# Altium footprint library SamacSys.PcbLib: 1008 footprints (part 13 of 63)
Each footprint in its own frame and in the unit in brackets; x right, y up, seen from the top. Pads: shape width x height; smd on the part's side, far side on the other; paste and mask are expansions set on the pad; w line width, h text height; cw(c..) or ccw(c..) is an arc to the next point about the centre after c.
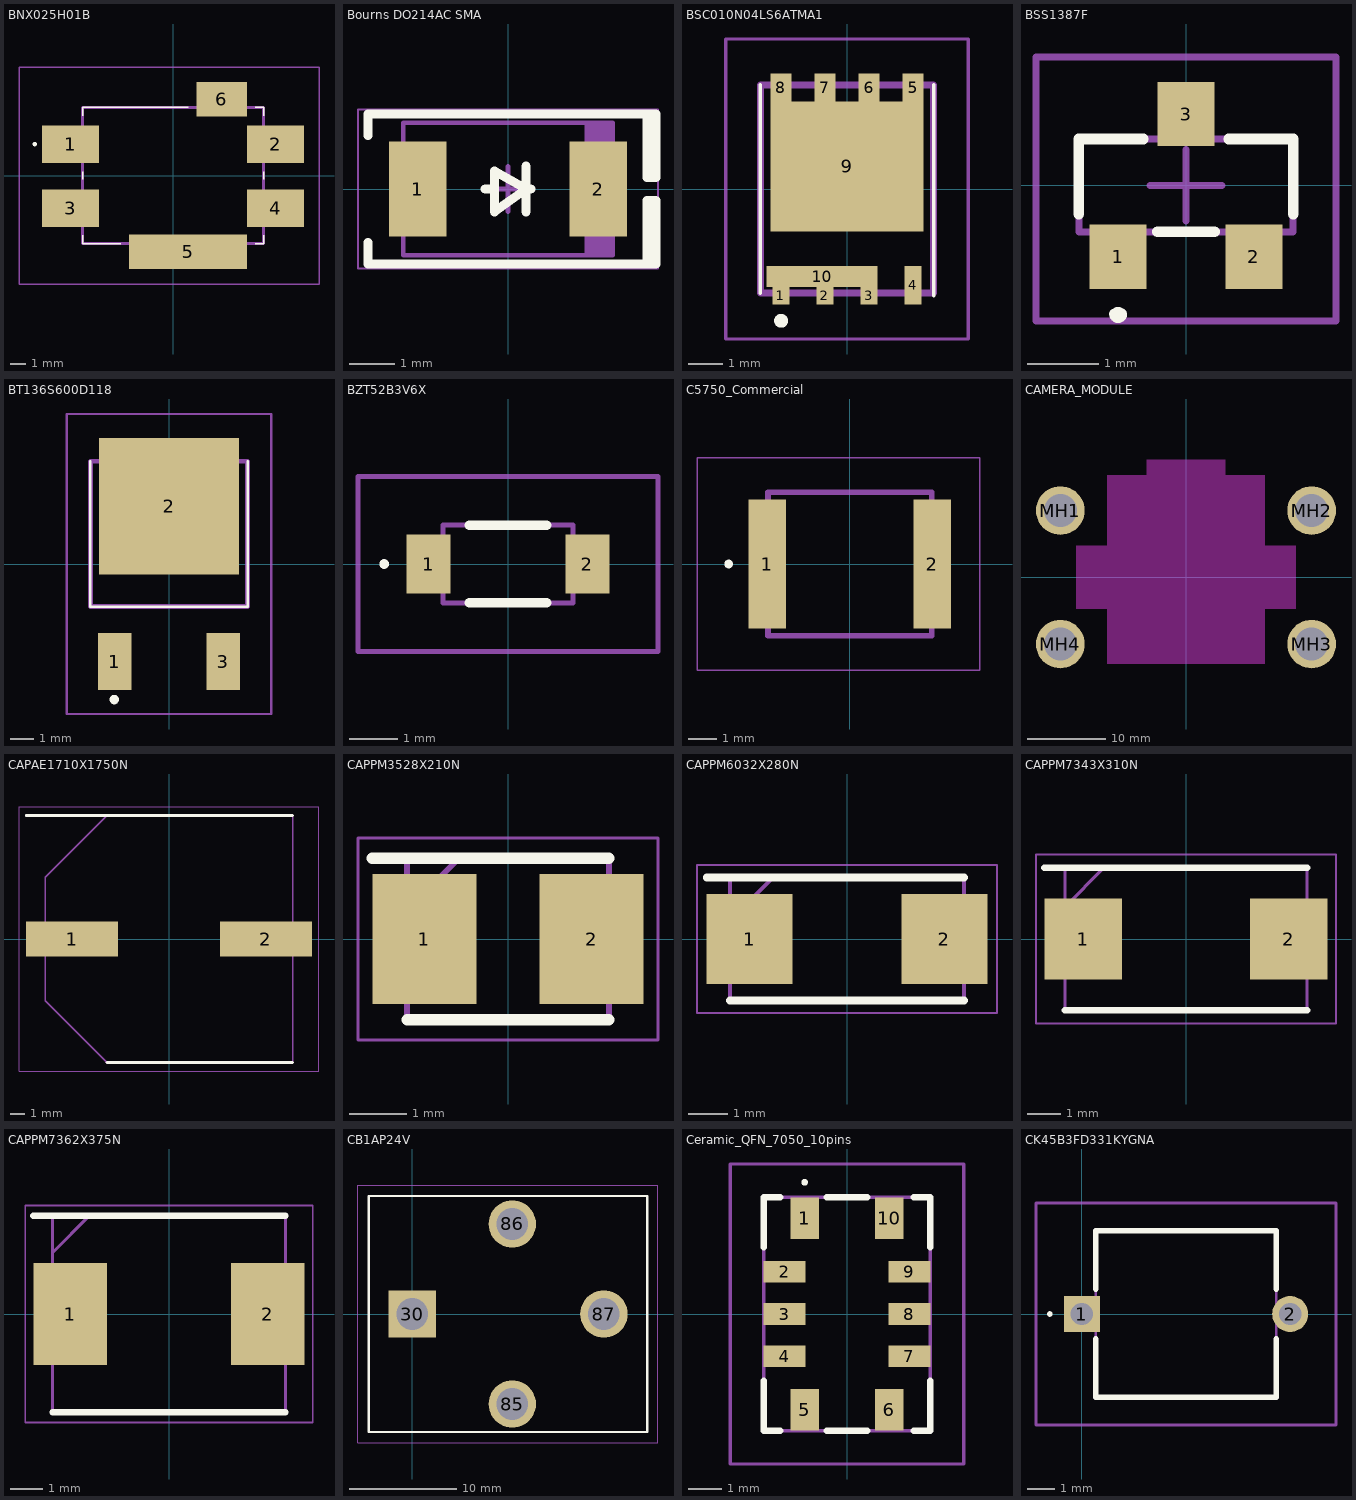
[diagram p12: the footprints below, top view; thin cyan lines are the x and y axes]

## BNX025H01B [mm]
pads (6):
  rect 3.8x2.5 smd: 1(-6.85,2.1) 2(6.85,2.1) 3(-6.85,-2.2) 4(6.85,-2.2)
  rect 7.9x2.3 smd: 5(1,-5.1)
  rect 3.4x2.3 smd: 6(3.25,5.1)
Top Overlay:
  lines w0.1: -6.05,-4.55 -3.5,-4.55 -6.05,-4.55 ; -6.05,-4.55 -6.05,-4 -6.05,-4.55 ; -6.05,4.55 -6.05,4 -6.05,4.55 ; -6.05,4.55 1,4.55 -6.05,4.55 ; 6.05,-4.55 6.05,-4 6.05,-4.55 ; 6.05,-4.55 5.5,-4.55 6.05,-4.55 ; 6.05,4.55 5.5,4.55 6.05,4.55 ; 6.05,4.55 6.05,4 6.05,4.55 ; -6.05,-0.25 -6.05,0.25 -6.05,-0.25 ; 6.05,-0.25 6.05,0.25 6.05,-0.25
  lines w0.2: -9.3,2.1 ccw(c-9.25,2.1) -9.2,2.1 ; -9.3,2.1 cw(c-9.25,2.1) -9.2,2.1 ; -9.3,2.1 ccw(c-9.25,2.1) -9.2,2.1
Assembly:
  lines w0.2: -6.05,-4.55 -6.05,4.55 6.05,4.55 6.05,-4.55 -6.05,-4.55
Countryard:
  lines w0.1: -10.3,-7.25 -10.3,7.25 9.75,7.25 9.75,-7.25 -10.3,-7.25
3D body "BNX025H01B.stp": height 3.7, standoff 0, extent -6.33,-4.55 5.77,4.55

## Bourns DO214AC SMA [mm] "Molded Diode, 2-Leads, Body 4.30x2.60mm, IPC Medium Density"
height 2.4
pads (2):
  rect 1.27x2.1 smd: 1(-1.985,0) 2(1.985,0)
Top Overlay:
  lines w0.2: -3.083,-1.175 -3.083,-1.651 3.25,-1.651 3.25,-0.254 3.056,-0.254 3.056,-1.651 ; -3.083,1.175 -3.083,1.651 3.25,1.651 3.25,0.254 3.056,0.254 3.056,1.651 ; -0.5,0 -0.3,0 ; 0.4,-0.5 0.4,0.5 ; 0.5,0 0.4,0 ; 0.4,0 -0.3,-0.5 -0.3,0.4 0.4,0
Assembly:
  rectangle: 1.681,-1.46 2.3,1.46
  lines w0.1: -2.3,-1.46 2.3,-1.46 2.3,1.46 -2.3,1.46 -2.3,-1.46
Countryard:
  lines w0.05: -3.3,-1.75 3.3,-1.75 3.3,1.75 -3.3,1.75 -3.3,-1.75
  lines w0.1: -0.5,0 0.5,0 ; 0,-0.5 0,0.5
3D body "SMA.STEP": height 2.4, standoff 0, extent -2.6,-1.375 2.6,1.375

## BSC010N04LS6ATMA1 [mm]
pads (10):
  rect 0.5x0.5 smd: 1(-1.905,-3.075) 2(-0.635,-3.075) 3(0.635,-3.075)
  rect 0.5x1.1 smd: 4(1.905,-2.775)
  rect 0.6x0.8 smd: 5(1.905,2.925) 6(0.635,2.925) 7(-0.635,2.925) 8(-1.905,2.925)
  rect 4.41x3.75 smd: 9(0,0.65)
  rect 3.2x0.6 smd: 10(-0.715,-2.525)
Top Overlay:
  lines w0.1: -2.5,-3 -2.5,3 ; 2.5,-3.075 2.5,3
  lines w0.2: -2,-3.8 cw(c-1.9,-3.8) -1.8,-3.8 cw(c-1.9,-3.8) -2,-3.8
Assembly:
  lines w0.2: -2.5,-3 -2.5,3 2.5,3 2.5,-3 -2.5,-3
Countryard:
  lines w0.1: -3.5,-4.325 -3.5,4.325 3.5,4.325 3.5,-4.325 -3.5,-4.325
3D body "BSC014N06NSATMA1.stp": height 1.1, standoff 0, extent -2.695,-3.075 2.695,3.075

## BSS1387F [mm]
pads (3):
  rect 0.8x0.9 smd: 1(-0.95,-1) 2(0.95,-1) 3(0,1)
Top Overlay:
  lines w0.1: -1,-1.8 cw(c-0.95,-1.8) -0.9,-1.8
  lines w0.15: -1.5,-0.4 -1.5,0.65 -0.6,0.65 ; -1,-1.8 ccw(c-0.95,-1.8) -0.9,-1.8 ; -0.4,-0.65 0.4,-0.65 ; 0.6,0.65 1.5,0.65 1.5,-0.4
Top Assembly:
  lines w0.1: -0.5,0 0.5,0 ; 0,-0.5 0,0.5 ; -1.5,-0.65 1.5,-0.65 1.5,0.65 -1.5,0.65 -1.5,-0.65
Top Courtyard:
  lines w0.1: -2.1,-1.9 2.1,-1.9 2.1,1.8 -2.1,1.8 -2.1,-1.9
3D body "BSS138-7-F.stp": height 1.05, standoff 0, extent -1.45,-1.2 1.45,1.2

## BT136S600D118 [mm]
pads (3):
  rect 1.4x2.4 smd: 1(-2.285,-4.1) 3(2.285,-4.1)
  rect 5.9x5.75 smd: 2(0,2.425)
Top Overlay:
  lines w0.1: -3.3,4.312 -3.3,-1.688 -3.3,-1.788 3.3,-1.788 3.3,4.312
  lines w0.2: -2.4,-5.694 ccw(c-2.3,-5.694) -2.2,-5.694 ccw(c-2.3,-5.694) -2.4,-5.694
Assembly:
  lines w0.2: -3.3,-1.788 3.3,-1.788 3.3,4.312 -3.3,4.312 -3.3,-1.788
Countryard:
  lines w0.1: -4.3,-6.3 4.3,-6.3 4.3,6.3 -4.3,6.3 -4.3,-6.3
3D body "BT136S-600D,118.stp": height 2.3, standoff -0.05, extent -3.2,-4.2 3.3,4.5

## BZT52B3V6X [mm]
pads (2):
  rect 0.91x1.22 smd: 1(-1.635,0) 2(1.635,0)
Top Overlay:
  lines w0.1: -2.6,0 cw(c-2.55,0) -2.5,0 cw(c-2.55,0) -2.6,0
  lines w0.2: -0.8,-0.8 0.8,-0.8 ; -0.8,0.8 0.8,0.8
Assembly:
  lines w0.1: -1.337,-0.8 -1.337,0.8 1.337,0.8 1.337,-0.8 -1.337,-0.8
Countryard:
  lines w0.1: -3.09,-1.8 -3.09,1.8 3.09,1.8 3.09,-1.8 -3.09,-1.8
3D body "BZT52-B3V6X.stp": height 1.2, standoff 0, extent -1.804,-0.796 1.796,0.804

## C5750_Commercial [mm]
pads (2):
  rect 1.3x4.5 smd: 1(-2.875,0) 2(2.875,0)
Top Overlay:
  circle w0.2: c-4.225,0 r0.05
Assembly:
  lines w0.2: -2.85,-2.5 -2.85,2.5 2.85,2.5 2.85,-2.5 -2.85,-2.5
Countryard:
  lines w0.05: -5.325,-3.7 -5.325,3.7 4.525,3.7 4.525,-3.7 -5.325,-3.7
3D body "C5750X7S2A226M280KB.stp": height 2.77, standoff 0.03, extent -2.65,-2.45 2.65,2.45

## CAMERA_MODULE [mm] "CamHi, camera module Hi3516EV200"
pads (4):
  round 6.2 hole 4.2 unplated: MH1(-16,8.5) MH2(16,8.5) MH3(16,-8.5) MH4(-16,-8.5)
Keep-Out Layer:
  board cut-out: -10,-11 -10,-4 -14,-4 -14,4 -10,4 -10,13 -5,13 -5,15 5,15 5,13 10,13 10,4 14,4 14,-4 10,-4 10,-11

## CAPAE1710X1750N [mm]
pads (2):
  rect 6.35x2.4 smd: 1(-6.7,0) 2(6.7,0)
Top Overlay:
  lines w0.2: -9.875,8.55 8.55,8.55 ; -4.275,-8.55 8.55,-8.55
Assembly:
  lines w0.1: -8.55,-4.275 -4.275,-8.55 8.55,-8.55 8.55,8.55 -4.275,8.55 -8.55,4.275 -8.55,-4.275
Countryard:
  lines w0.05: -10.375,-9.15 -10.375,9.15 10.375,9.15 10.375,-9.15 -10.375,-9.15
3D body "UCD2A101MNQ1MS.stp": height 17.5, standoff 0, extent -9.15,-8.65 9.15,8.65

## CAPPM3528X210N [mm]
pads (2):
  rect 1.8x2.25 smd: 1(-1.45,0) 2(1.45,0)
Top Overlay:
  lines w0.2: -2.35,1.4 1.75,1.4 ; -1.75,-1.4 1.75,-1.4
Assembly:
  lines w0.1: -1.75,0.5 -0.85,1.4 ; -1.75,-1.4 1.75,-1.4 1.75,1.4 -1.75,1.4 -1.75,-1.4
Countryard:
  lines w0.05: -2.6,-1.75 2.6,-1.75 2.6,1.75 -2.6,1.75 -2.6,-1.75
3D body "293D107X0010B2TE3.stp": height 2.13, standoff 0, extent -1.864,-1.539 1.87,1.535

## CAPPM6032X280N [mm]
pads (2):
  rect 2.2x2.3 smd: 1(-2.5,0) 2(2.5,0)
Top Overlay:
  lines w0.2: -3.6,1.575 3,1.575 ; -3,-1.575 3,-1.575
Assembly:
  lines w0.1: -3,0.475 -1.9,1.575 ; -3,-1.575 -3,1.575 3,1.575 3,-1.575 -3,-1.575
Countryard:
  lines w0.05: -3.85,-1.9 -3.85,1.9 3.85,1.9 3.85,-1.9 -3.85,-1.9
3D body "TAJC107K016RNJ.stp": height 2.8, standoff 0, extent -3,-1.575 3,1.575

## CAPPM7343X310N [mm]
pads (2):
  rect 2.35x2.45 smd: 1(-3.1,0) 2(3.1,0)
Top Overlay:
  lines w0.2: -4.275,2.15 3.65,2.15 ; -3.65,-2.15 3.65,-2.15
Assembly:
  lines w0.1: -3.65,0.975 -2.475,2.15 ; -3.65,-2.15 -3.65,2.15 3.65,2.15 3.65,-2.15 -3.65,-2.15
Countryard:
  lines w0.05: -4.525,-2.55 -4.525,2.55 4.525,2.55 4.525,-2.55 -4.525,-2.55
3D body "293D226X9035D2TE3.stp": height 2.92, standoff 0, extent -3.59,-2.209 3.598,2.207

## CAPPM7362X375N [mm]
pads (2):
  rect 2.3x3.2 smd: 1(-3.1,0) 2(3.1,0)
Top Overlay:
  lines w0.2: -4.25,3.075 3.65,3.075 ; -3.65,-3.075 3.65,-3.075
Assembly:
  lines w0.1: -3.65,1.925 -2.5,3.075 ; -3.65,-3.075 -3.65,3.075 3.65,3.075 3.65,-3.075 -3.65,-3.075
Countryard:
  lines w0.05: -4.5,-3.4 -4.5,3.4 4.5,3.4 4.5,-3.4 -4.5,-3.4
3D body "TAJV226K050RNJ.stp": height 3.75, standoff 0, extent -3.65,-3.075 3.65,3.075

## CB1AP24V [mm]
pads (4):
  rect 4.425x4.425 hole 2.95: 30(0,0)
  round 4.425 hole 2.95: 85(9.35,-8.4) 86(9.35,8.4) 87(17.9,0)
Top Overlay:
  lines w0.2: -3.45,11 -4.05,11 ; -4.05,11 -4.05,-11 21.95,-11 21.95,11 -4.05,11
Assembly:
  lines w0.1: -4.05,-11 -4.05,11 21.95,11 21.95,-11 -4.05,-11
Countryard:
  lines w0.1: -5.05,-12 -5.05,12 22.95,12 22.95,-12 -5.05,-12
3D body "CB1A-P-24V.stp": height 25.1, standoff -5, extent -4.05,-11 21.95,11

## Ceramic_QFN_7050_10pins [mm]
pads (10):
  rect 0.85x1.25 smd: 1(-1.27,2.875) 5(-1.27,-2.875) 6(1.27,-2.875) 10(1.27,2.875)
  rect 1.25x0.65 smd: 2(-1.875,1.27) 3(-1.875,0) 4(-1.875,-1.27) 7(1.875,-1.27) 8(1.875,0) 9(1.875,1.27)
Top Overlay:
  lines w0.1: -1.27,3.9 ccw(c-1.27,3.95) -1.27,4 ccw(c-1.27,3.95) -1.27,3.9
  lines w0.2: -2.5,-2 -2.5,-3.5 -2,-3.5 ; -2.5,2 -2.5,3.5 -2,3.5 ; -0.6,-3.5 0.6,-3.5 ; -0.6,3.5 0.6,3.5 ; 2,-3.5 2.5,-3.5 2.5,-2 ; 2,3.5 2.5,3.5 2.5,2
Assembly:
  lines w0.1: -2.5,-3.5 -2.5,3.5 2.5,3.5 2.5,-3.5 -2.5,-3.5
Countryard:
  lines w0.1: -3.5,-4.5 -3.5,4.5 3.5,4.5 3.5,-4.5 -3.5,-4.5
3D body "SIT5503AB-WW-33E0-10.00000.stp": height 2.05, standoff 0, extent -2.5,-3.5 2.5,3.5

## CK45B3FD331KYGNA [mm]
pads (2):
  rect 1.3x1.3 hole 0.8: 1(0,0)
  round 1.3 hole 0.8: 2(7.5,0)
Top Overlay:
  lines w0.1: -1.2,0 cw(c-1.15,0) -1.1,0 cw(c-1.15,0) -1.2,0
  lines w0.2: 0.5,-0.9 0.5,-3 7,-3 7,-0.9 ; 0.5,0.9 0.5,3 7,3 7,0.9
Assembly:
  lines w0.1: 0.5,-3 0.5,3 7,3 7,-3 0.5,-3
Countryard:
  lines w0.1: -1.65,-4 -1.65,4 9.15,4 9.15,-4 -1.65,-4
3D body "CK45-B3FD331KYGNA.stp": height 10.6, standoff -5, extent -0.298,-3 7.8,3